# Altium schematic symbol library LT8711EFE#TRPBF.SchLib: 1 symbol
Pins are listed as number, name and electrical type; pins without a type are passive.

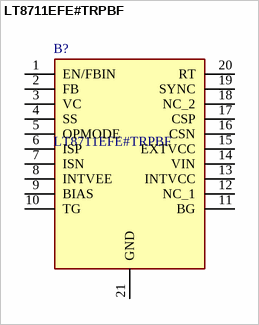
[diagram p0: symbol LT8711EFE#TRPBF]

## LT8711EFE#TRPBF
designator B?
Micropower Synchronous Multitopology Controller with 42V Input Capability; Manufacturer_Name: Analog Devices; Geometry.Height: 1.2mm; Manufacturer_Part_Number: LT8711EFE#TRPBF; Mouser Part Number: 584-LT8711EFETRPBF; Mouser Price/Stock: https://www.mouser.co.uk/ProductDetail/Analog-Devices/LT8711EFETRPBF?qs=YCa%2FAAYMW03ypo7nngD4zA%3D%3D; Arrow Part Number: LT8711EFE#TRPBF; Arrow Price/Stock: https://www.arrow.com/en/products/lt8711efetrpbf/analog-devices?region=nac; Datasheet Link: https://www.analog.com/LT8711/datasheet
footprint SOP65P640X120-21N
pins: 1 EN/FBIN, 2 FB, 3 VC, 4 SS, 5 OPMODE, 6 ISP, 7 ISN, 8 INTVEE, 9 BIAS, 10 TG, 11 BG, 12 NC_1, 13 INTVCC, 14 VIN, 15 EXTVCC, 16 CSN, 17 CSP, 18 NC_2, 19 SYNC, 20 RT, 21 GND